# EAGLE library part 74LVC125AD,118 (library 74LVC125AD_118)
74LVC125A - Quad buffer/line driver with 5 V tolerant input/outputs; 3-state@en-us Source: Datasheet <https://assets.nexperia.com/documents/data-sheet/74LVC125A.pdf>
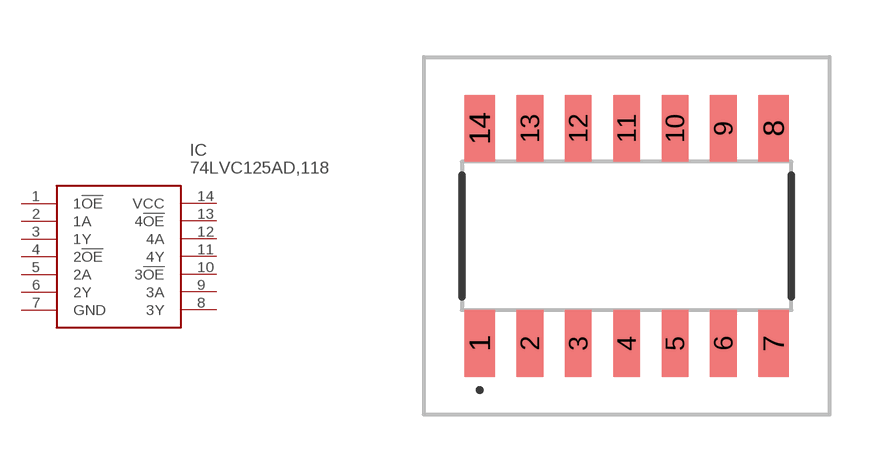
[diagram p0: symbol with the pads of 74LVC125AD118; footprint 74LVC125AD118]

Designator prefix IC

## 74LVC125AD,118 (Description: 74LVC125A - Quad buffer/line driver with 5 V tolerant input/outputs; 3-state@en-us; Height: 1.75mm; Manufacturer_Name: Nexperia; Manufacturer_Part_Number: 74LVC125AD,118; Mouser_Part_Number: 771-74LVC125AD-T; Mouser_Price-Stock: https://www.mouser.co.uk/ProductDetail/Nexperia/74LVC125AD118?qs=me8TqzrmIYXjiwMtzMYzqA%3D%3D)  [74LVC125AD118]
1  1!OE
2  1A
3  1Y
4  2!OE
5  2A
6  2Y
7  GND
8  3Y
9  3A
10  3!OE
11  4Y
12  4A
13  4!OE
14  VCC

## Footprint 74LVC125AD118 (pad centres in mm)
74LVC125AD,118-2
smd 0.8 x 1.75: 1 -3.86,-2.825; 7 3.86,-2.825; 8 3.86,2.825; 14 -3.86,2.825
smd 0.7 x 1.75: 2 -2.54,-2.825; 3 -1.27,-2.825; 4 0,-2.825; 5 1.27,-2.825; 6 2.54,-2.825; 9 2.54,2.825; 10 1.27,2.825; 11 0,2.825; 12 -1.27,2.825; 13 -2.54,2.825